# Altium footprint library KM_ALTIUM.PcbLib: 265 footprints (part 1 of 17)
Each footprint in its own frame and in the unit in brackets; x right, y up, seen from the top. Pads: shape width x height; smd on the part's side, far side on the other; paste and mask are expansions set on the pad; w line width, h text height; cw(c..) or ccw(c..) is an arc to the next point about the centre after c.
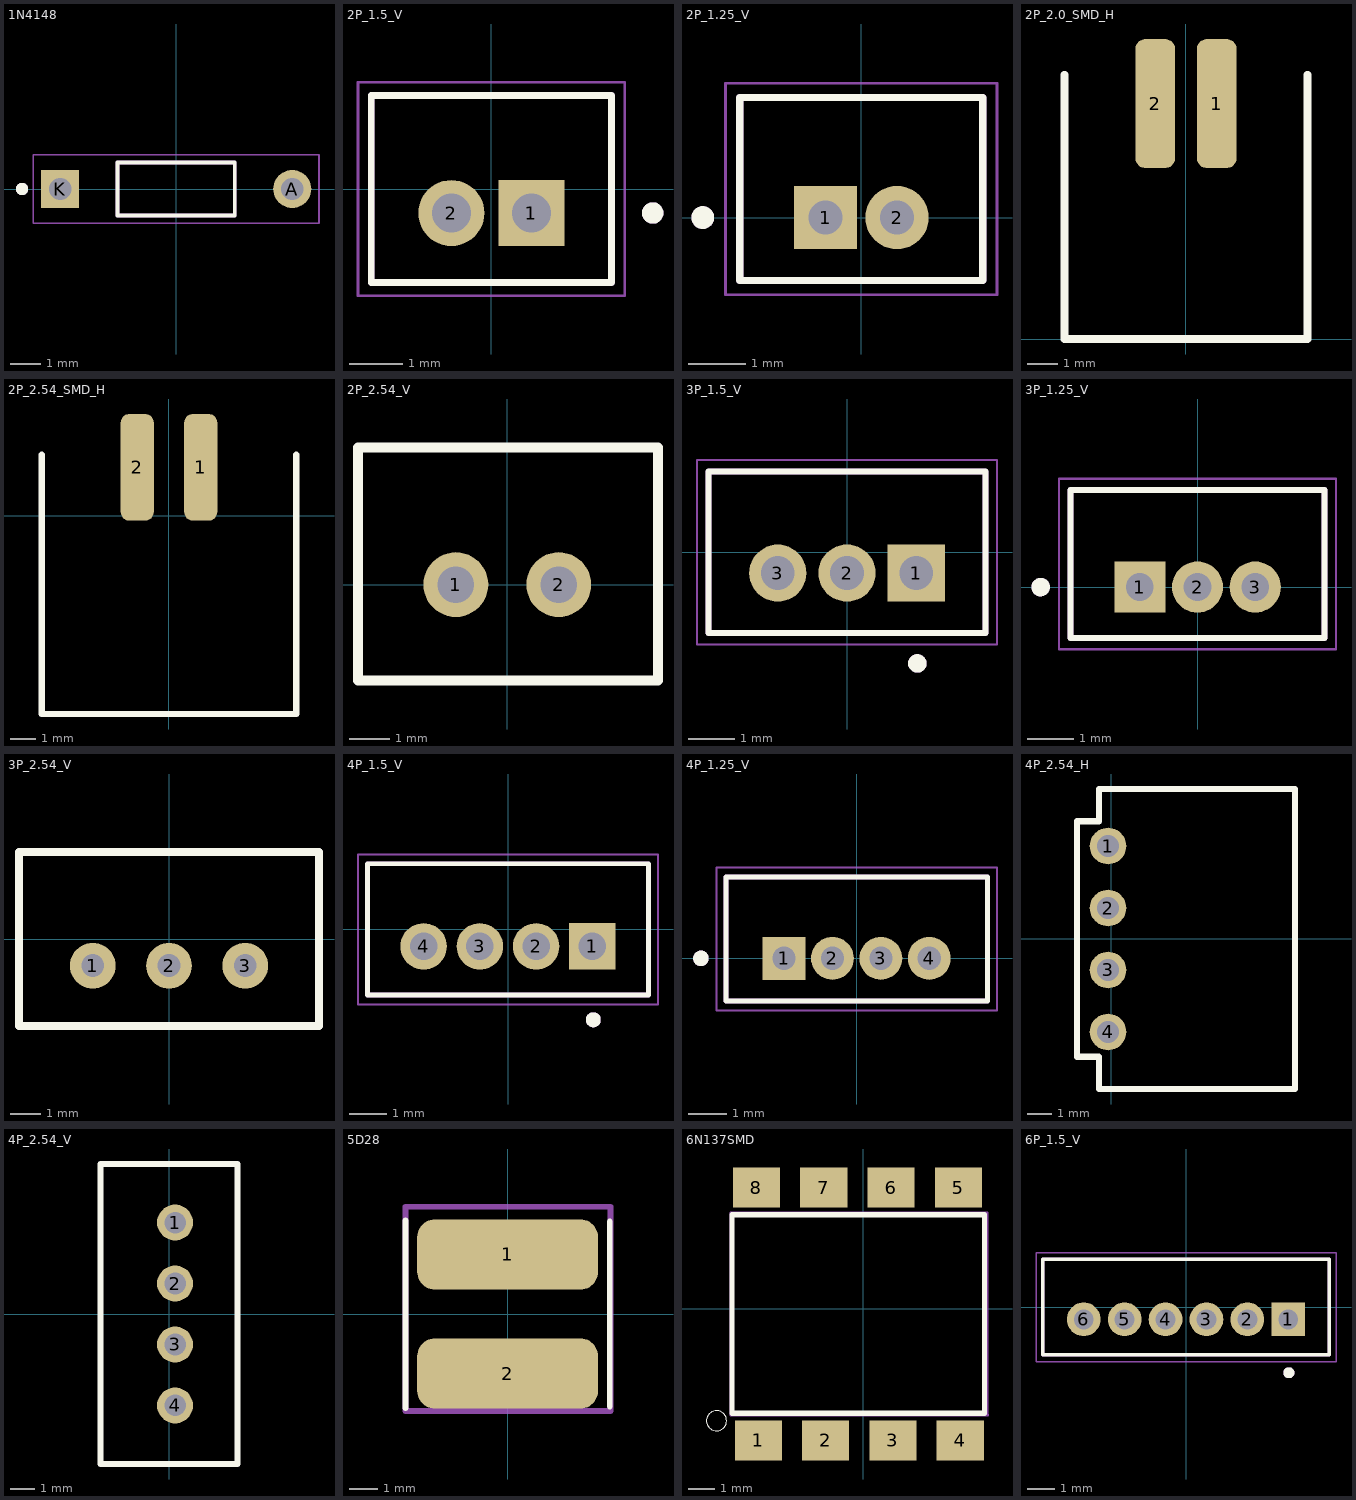
[diagram p0: the footprints below, top view; thin cyan lines are the x and y axes]

## 1N4148 [mm]
height 1.91
pads (2):
  round 1.238 hole 0.73: A(3.768,0)
  rect 1.238x1.238 / inner round 1.238 / far side rect 1.238x1.238 hole 0.73: K(-3.768,0)
Top Overlay:
  circle w0.2: c-5,0 r0.1
  lines w0.127: -1.903,-0.86 1.903,-0.86 1.903,0.86 -1.903,0.86 -1.903,-0.86
Mechanical 13:
  circle w0.2: c-5,0 r0.1
  lines w0.127: -1.903,-0.86 1.903,-0.86 1.903,0.86 -1.903,0.86 -1.903,-0.86
Mechanical 15:
  lines w0.05: -4.637,-1.11 4.637,-1.11 4.637,1.11 -4.637,1.11 -4.637,-1.11
3D body "1N4148.STEP": height 1.91, standoff -22.92, extent -4.003,-0.955 4.003,0.955

## 2P_1.5_V [mm]
height 4.5
pads (2):
  rect 1.238x1.238 / inner round 1.238 / far side rect 1.238x1.238 hole 0.73: 1(0.75,-0.45)
  round 1.238 hole 0.73: 2(-0.75,-0.45)
Top Overlay:
  circle w0.2: c3.023,-0.45 r0.1
  lines w0.127: -2.25,-1.75 -2.25,1.75 2.25,1.75 2.25,-1.75 -2.25,-1.75
Mechanical 13:
  circle w0.2: c3.023,-0.45 r0.1
  lines w0.127: -2.25,-1.75 -2.25,1.75 2.25,1.75 2.25,-1.75 -2.25,-1.75
Mechanical 15:
  lines w0.05: -2.5,-2 -2.5,2 2.5,2 2.5,-2 -2.5,-2
3D body "step_temp.STEP": height 4.5, standoff -2.7, extent -2.25,-1.778 2.25,1.722

## 2P_1.25_V [mm] "1.25"
pads (2):
  rect 1.108x1.108 hole 0.6: 1(-0.625,0)
  round 1.108 hole 0.6: 2(0.625,0)
Top Overlay:
  circle w0.2: c-2.775,0 r0.1
  lines w0.127: -2.125,-1.1 -2.125,2.1 2.125,2.1 2.125,-1.1 -2.125,-1.1
Mechanical 13:
  circle w0.2: c-2.775,0 r0.1
  lines w0.127: -2.125,-1.1 -2.125,2.1 2.125,2.1 2.125,-1.1 ; -2.125,-1.1 2.125,-1.1 ; -2.125,-1.1 2.125,-1.1
Mechanical 15:
  lines w0.05: -2.375,-1.35 -2.375,2.35 2.375,2.35 2.375,-1.35 -2.375,-1.35
3D body "step_temp.STEP": height 4.1, standoff -2.4, extent -2.125,-1.143 2.125,2.057

## 2P_2.0_SMD_H [mm] "2P"
pads (2):
  rrect50% 1.3x4.2 smd: 1(1,7.661) 2(-1,7.661)
Top Overlay:
  lines w0.254: -3.95,8.6 -3.95,0 3.95,0 3.95,8.6
3D body "JST-PH-2 v1.step": height 4.8, standoff 0, extent -3.95,0 3.95,8.6

## 2P_2.54_SMD_H [mm]
pads (2):
  rrect50% 1.3x4.2 smd: 1(1.25,1.905) 2(-1.25,1.905)
Top Overlay:
  lines w0.254: -5,2.4 -5,-7.8 5,-7.8 5,2.4
3D body "JST-XH2-SMD.step": height 6, standoff -0.1, extent -5,-7.8 5,2.4

## 2P_2.54_V [mm]
pads (2):
  round 1.6 hole 0.9: 1(-1.27,0) 2(1.27,0)
Top Overlay:
  lines w0.254: -3.683,-2.367 -3.683,3.383 3.717,3.383 3.717,-2.367 -3.683,-2.367
3D body "B2B-XH-A-LF--SN---3DModel-STEP-269445.STEP": height 7, standoff -3.4, extent -3.683,-2.367 3.717,3.383

## 3P_1.5_V [mm]
pads (3):
  rect 1.238x1.238 / inner round 1.238 / far side rect 1.238x1.238 hole 0.73: 1(1.5,-0.45)
  round 1.238 hole 0.73: 2(0,-0.45) 3(-1.5,-0.45)
Top Overlay:
  circle w0.2: c1.523,-2.408 r0.1
  lines w0.127: -3,-1.75 -3,1.75 3,1.75 3,-1.75 -3,-1.75
Mechanical 13:
  circle w0.2: c1.523,-2.408 r0.1
  lines w0.127: -3,-1.75 -3,1.75 3,1.75 3,-1.75 -3,-1.75
Mechanical 15:
  lines w0.05: -3.25,-2 -3.25,2 3.25,2 3.25,-2 -3.25,-2
3D body "step_temp.STEP": height 4.5, standoff -2.7, extent -3,-1.722 3,1.778

## 3P_1.25_V [mm]
pads (3):
  rect 1.108x1.108 / inner round 1.108 / far side rect 1.108x1.108 hole 0.6: 1(-1.25,0)
  round 1.108 hole 0.6: 2(0,0) 3(1.25,0)
Top Overlay:
  circle w0.2: c-3.4,0 r0.1
  lines w0.127: -2.75,-1.1 2.75,-1.1 2.75,2.1 -2.75,2.1 -2.75,-1.1
Mechanical 13:
  circle w0.2: c-3.4,0 r0.1
  lines w0.127: -2.75,-1.1 2.75,-1.1 ; -2.75,-1.1 2.75,-1.1 ; -2.75,-1.1 -2.75,2.1 2.75,2.1 2.75,-1.1
Mechanical 15:
  lines w0.05: -3,-1.35 3,-1.35 3,2.35 -3,2.35 -3,-1.35
3D body "step_temp.STEP": height 4.1, standoff -2.4, extent -2.75,-1.168 2.75,2.032

## 3P_2.54_V [mil]
pads (3):
  round 60 hole 30: 1(-100,-35) 2(0,-35) 3(100,-35)
Top Overlay:
  lines w10: -196.85,-114.17 -196.85,114.17 196.85,114.17 196.85,-114.17 -196.85,-114.17
3D body "jst 1 v4.step": height 275.59, standoff -167.32, extent -196.85,-114.17 196.85,114.17

## 4P_1.5_V [mm]
pads (4):
  rect 1.238x1.238 / inner round 1.238 / far side rect 1.238x1.238 hole 0.73: 1(2.25,-0.45)
  round 1.238 hole 0.73: 2(0.75,-0.45) 3(-0.75,-0.45) 4(-2.25,-0.45)
Top Overlay:
  circle w0.2: c2.273,-2.408 r0.1
  lines w0.127: -3.75,-1.75 3.75,-1.75 3.75,1.75 -3.75,1.75 -3.75,-1.75
Mechanical 13:
  circle w0.2: c2.273,-2.408 r0.1
  lines w0.127: -3.75,-1.75 3.75,-1.75 3.75,1.75 -3.75,1.75 -3.75,-1.75
Mechanical 15:
  lines w0.05: -4,-2 4,-2 4,2 -4,2 -4,-2
3D body "step_temp.STEP": height 4.5, standoff -2.7, extent -3.75,-1.722 3.75,1.778

## 4P_1.25_V [mm]
pads (4):
  rect 1.108x1.108 / inner round 1.108 / far side rect 1.108x1.108 hole 0.6: 1(-1.875,0)
  round 1.108 hole 0.6: 2(-0.625,0) 3(0.625,0) 4(1.875,0)
Top Overlay:
  circle w0.2: c-4.025,0 r0.1
  lines w0.127: -3.375,-1.1 3.375,-1.1 3.375,2.1 -3.375,2.1 -3.375,-1.1
Mechanical 13:
  circle w0.2: c-4.025,0 r0.1
  lines w0.127: -3.375,-1.1 3.375,-1.1 ; -3.375,-1.1 3.375,-1.1 ; -3.375,-1.1 -3.375,2.1 3.375,2.1 3.375,-1.1
Mechanical 15:
  lines w0.05: -3.625,-1.35 3.625,-1.35 3.625,2.35 -3.625,2.35 -3.625,-1.35
3D body "step_temp.STEP": height 4.1, standoff -2.4, extent -3.375,-1.168 3.375,2.032

## 4P_2.54_H [mm]
pads (4):
  round 1.5 hole 0.9: 1(-0.127,3.81) 2(-0.127,1.27) 3(-0.127,-1.27) 4(-0.127,-3.81)
Top Overlay:
  lines w0.254: -1.397,-4.826 -0.508,-4.826 -0.503,-4.831 -0.503,-6.147 7.534,-6.147 7.534,6.147 -0.503,6.147 -0.503,4.826 -1.27,4.826 -1.397,4.826 -1.397,-4.826
3D body "JST - XH - Thru (R) - 4Pin - 2.54mm.stp": height 5.84, standoff -3.38, extent -0.503,-6.147 7.534,6.147

## 4P_2.54_V [mm] "2.54mm"
pads (4):
  round 1.5 hole 0.9: 1(0.254,3.81) 2(0.254,1.27) 3(0.254,-1.27) 4(0.254,-3.81)
Top Overlay:
  lines w0.254: -2.85,-6.25 2.85,-6.25 2.85,6.25 -2.85,6.25 -2.85,-6.25
3D body "JST-2.54X4P.step": height 7, standoff -3, extent -2.85,-6.25 2.85,6.25

## 5D28 [mm]
pads (2):
  rrect50% 6.3x2.45 smd: 1(0,2.075) 2(0,-2.075)
Top Overlay:
  lines w0.203: -3.556,-3.277 -3.556,3.251 ; 3.556,-3.226 3.556,3.226
Mechanical 3:
  lines w0.203: -3.556,-3.378 3.581,-3.378 3.581,3.734 -3.556,3.734 -3.556,-3.378
3D body "User Library-cdrh5d28.STEP": height 2.91, standoff -0.09, extent -2.977,-3 3.023,3

## 6N137SMD [mm]
pads (8):
  rect 1.78x1.52 smd: 1(-3.96,-4.96) 2(-1.42,-4.96) 3(1.12,-4.96) 4(3.66,-4.96) 5(3.59,4.58) 6(1.05,4.58) 7(-1.49,4.58) 8(-4.03,4.58)
Top Overlay:
  circle w0: c-5.538,-4.221 r0.381
  lines w0.203: -4.953,-3.937 -4.953,3.556 4.572,3.556 4.572,-3.937 -4.953,-3.937
Mechanical 13:
  lines w0.1: 4.68,-3.98 4.68,3.62 -5,3.62 -5,-4 4.69,-4
3D body "step_temp.STEP": height 4.6, standoff 0, extent -4.84,-5.08 4.84,5.08

## 6P_1.5_V [mm]
pads (6):
  rect 1.238x1.238 / inner round 1.238 / far side rect 1.238x1.238 hole 0.73: 1(3.75,-0.45)
  round 1.238 hole 0.73: 2(2.25,-0.45) 3(0.75,-0.45) 4(-0.75,-0.45) 5(-2.25,-0.45) 6(-3.75,-0.45)
Top Overlay:
  circle w0.2: c3.773,-2.408 r0.1
  lines w0.127: -5.25,-1.75 -5.25,1.75 5.25,1.75 5.25,-1.75 -5.25,-1.75
Mechanical 13:
  circle w0.2: c3.773,-2.408 r0.1
  lines w0.127: -5.25,-1.75 -5.25,1.75 5.25,1.75 5.25,-1.75 -5.25,-1.75
Mechanical 15:
  lines w0.05: -5.5,-2 -5.5,2 5.5,2 5.5,-2 -5.5,-2
3D body "jst-1.5mm-6P.STEP": height 4.5, standoff -2.7, extent -5.25,-1.75 5.25,1.75